# Altium footprint library WR-WTB_2.00mm.PcbLib: 70 footprints (part 2 of 5)
Each footprint in its own frame and in the unit in brackets; x right, y up, seen from the top. Pads: shape width x height; smd on the part's side, far side on the other; paste and mask are expansions set on the pad; w line width, h text height; cw(c..) or ccw(c..) is an arc to the next point about the centre after c.
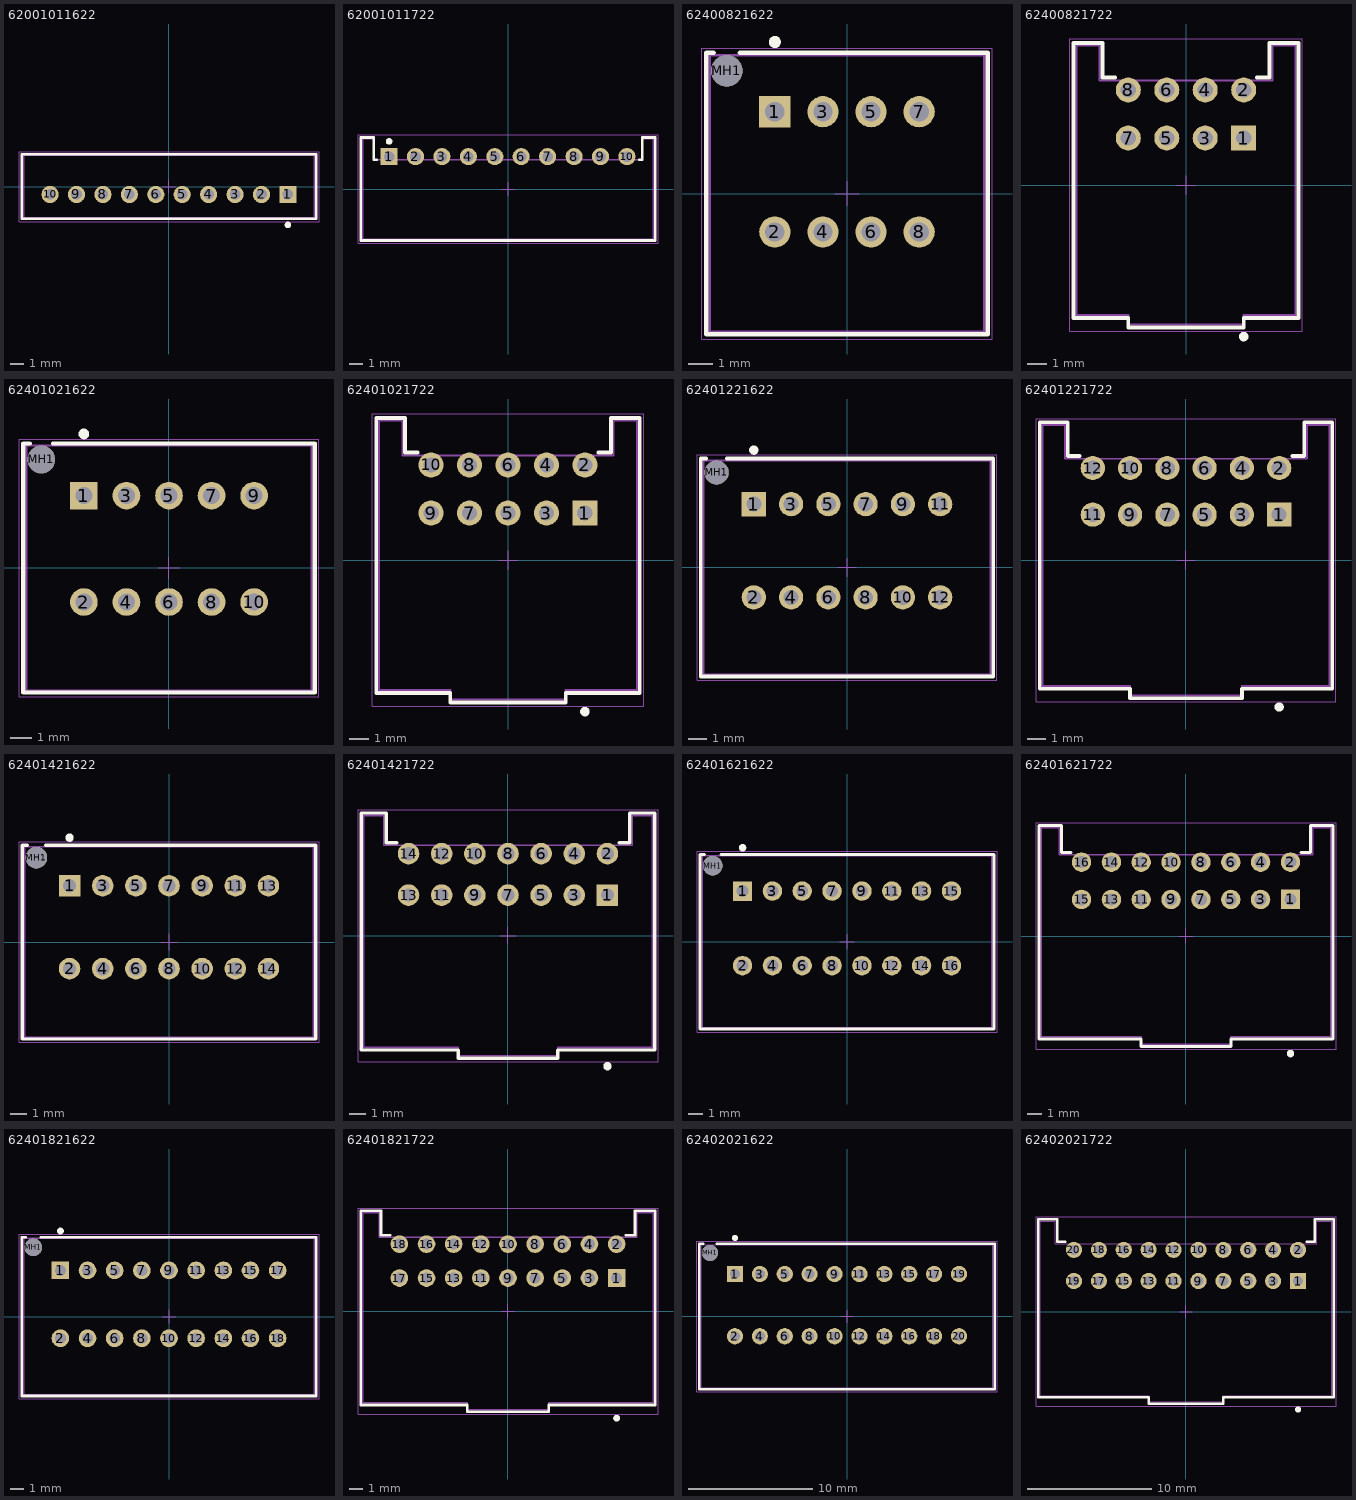
[diagram p1: the footprints below, top view; thin cyan lines are the x and y axes]

## 62001011622 [mm] "2.00mm Male Vertical Shrouded Header, 10p"
height 6.1
pads (10):
  rect 1.3x1.3 hole 0.8: 1(9,-0.6)
  round 1.3 hole 0.8: 2(7,-0.6) 3(5,-0.6) 4(3,-0.6) 5(1,-0.6) 6(-1,-0.6) 7(-3,-0.6) 8(-5,-0.6) 9(-7,-0.6) 10(-9,-0.6)
Top Overlay:
  circle w0.25: c9,-2.9 r0.125
  lines w0.2: -11.15,-2.45 11.15,-2.45 11.15,2.45 -11.15,2.45 -11.15,-2.45
Mechanical 13:
  lines w0.1: -11,-2.35 -11,2.35 11,2.35 11,-2.35 -11,-2.35
Mechanical 15:
  lines w0.05: -0.5,0 0.5,0 ; 0,-0.5 0,0.5 ; -11.35,-2.65 11.35,-2.65 11.35,2.65 -11.35,2.65 -11.35,-2.65
3D body "62001011622.stp": height 6.13, standoff -3.37, extent -11,-2.35 11,2.35

## 62001011722 [mm] "2.00mm Male Horizontal Shrouded Header, 10p"
height 4.5
pads (10):
  rect 1.3x1.3 hole 0.8: 1(-9,2.45)
  round 1.3 hole 0.8: 2(-7,2.45) 3(-5,2.45) 4(-3,2.45) 5(-1,2.45) 6(1,2.45) 7(3,2.45) 8(5,2.45) 9(7,2.45) 10(9,2.45)
Top Overlay:
  circle w0.25: c-9,3.6 r0.125
  lines w0.2: -9.95,2.2 -10.15,2.2 -10.15,3.9 -11.15,3.9 -11.15,-3.9 11.15,-3.9 11.15,3.9 10.15,3.9 10.15,2.2 9.95,2.2
Mechanical 13:
  lines w0.1: -11,-3.8 11,-3.8 11,3.8 10.15,3.8 10.15,2.2 -10.15,2.2 -10.15,3.8 -11,3.8 -11,-3.8
Mechanical 15:
  lines w0.05: -0.5,0 0.5,0 ; 0,-0.5 0,0.5 ; -11.35,-4.1 -11.35,4.1 11.35,4.1 11.35,-4.1 -11.35,-4.1
3D body "62001011722.stp": height 4.83, standoff -3.27, extent -11,-3.8 11,3.8

## 62400821622 [mm] "2.00mm Male Dual Row Vertical Shrouded Header with positive locking, 8p"
height 11.6
pads (9):
  rect 1.3x1.3 hole 0.8: 1(-3,3.4)
  round 1.3 hole 0.8: 2(-3,-1.6) 3(-1,3.4) 4(-1,-1.6) 5(1,3.4) 6(1,-1.6) 7(3,3.4) 8(3,-1.6)
  round 1.3 hole 1.3 unplated: MH1(-5,5.1)
Top Overlay:
  circle w0.25: c-3,6.3 r0.125
  lines w0.2: -5.55,5.85 -5.85,5.85 -5.85,-5.85 5.85,-5.85 5.85,5.85 -4.45,5.85
Mechanical 13:
  lines w0.1: -5.7,-5.75 -5.7,5.75 ; -5.7,-5.75 5.7,-5.75 5.7,5.75 -5.7,5.75 ; -5.7,-5.75 -5.7,5.75
Mechanical 15:
  lines w0.05: -0.5,0 0.5,0 ; 0,-0.5 0,0.5 ; -6.05,-6.05 6.05,-6.05 6.05,6.05 -6.05,6.05 -6.05,-6.05
3D body "62400821622.stp": height 9.78, standoff -3.17, extent -5.7,-5.75 5.7,5.75

## 62400821722 [mm] "2.00mm Male Dual Row Horizontal Shrouded Header with positive locking, 8p"
height 11.7
pads (8):
  rect 1.3x1.3 hole 0.8: 1(3,2.45)
  round 1.3 hole 0.8: 2(3,4.95) 3(1,2.45) 4(1,4.95) 5(-1,2.45) 6(-1,4.95) 7(-3,2.45) 8(-3,4.95)
Top Overlay:
  circle w0.25: c3,-7.875 r0.125
  lines w0.2: -3.7,5.6 -4.35,5.6 -4.35,7.4 -5.85,7.4 -5.85,-6.9 -3,-6.9 -3,-7.4 3,-7.4 3,-6.9 5.85,-6.9 5.85,7.4 4.35,7.4 4.35,5.6 3.7,5.6
Mechanical 13:
  lines w0.1: -5.7,-6.75 -3,-6.75 -3,-7.25 3,-7.25 3,-6.75 5.7,-6.75 5.7,7.25 4.5,7.25 4.5,5.45 -4.5,5.45 -4.5,7.25 -5.7,7.25 -5.7,-6.75
Mechanical 15:
  lines w0.05: -0.5,0 0.5,0 ; 0,-0.5 0,0.5 ; -6.05,-7.6 6.05,-7.6 6.05,7.6 -6.05,7.6 -6.05,-7.6
3D body "62400821722.stp": height 11.73, standoff -3.17, extent -5.7,-7.25 5.7,7.25

## 62401021622 [mm] "2.00mm Male Dual Row Vertical Shrouded Header with positive locking, 10p"
height 11.6
pads (11):
  rect 1.3x1.3 hole 0.8: 1(-4,3.4)
  round 1.3 hole 0.8: 2(-4,-1.6) 3(-2,3.4) 4(-2,-1.6) 5(0,3.4) 6(0,-1.6) 7(2,3.4) 8(2,-1.6) 9(4,3.4) 10(4,-1.6)
  round 1.3 hole 1.3 unplated: MH1(-6,5.1)
Top Overlay:
  circle w0.25: c-4,6.3 r0.125
  lines w0.2: -6.55,5.85 -6.85,5.85 -6.85,-5.85 6.85,-5.85 6.85,5.85 -5.45,5.85
Mechanical 13:
  lines w0.1: -6.7,-5.75 -6.7,5.75 ; -6.7,-5.75 6.7,-5.75 6.7,5.75 -6.7,5.75 ; -6.7,-5.75 -6.7,5.75
Mechanical 15:
  lines w0.05: -0.5,0 0.5,0 ; 0,-0.5 0,0.5 ; -7.05,-6.05 7.05,-6.05 7.05,6.05 -7.05,6.05 -7.05,-6.05
3D body "62401021622.stp": height 9.78, standoff -3.17, extent -6.7,-5.75 6.7,5.75

## 62401021722 [mm] "2.00mm Male Dual Row Horizontal Shrouded Header with positive locking, 10p"
height 11.7
pads (10):
  rect 1.3x1.3 hole 0.8: 1(4,2.45)
  round 1.3 hole 0.8: 2(4,4.95) 3(2,2.45) 4(2,4.95) 5(0,2.45) 6(0,4.95) 7(-2,2.45) 8(-2,4.95) 9(-4,2.45) 10(-4,4.95)
Top Overlay:
  circle w0.25: c4,-7.875 r0.125
  lines w0.2: -4.7,5.6 -5.35,5.6 -5.35,7.4 -6.85,7.4 -6.85,-6.9 -3,-6.9 -3,-7.4 3,-7.4 3,-6.9 6.85,-6.9 6.85,7.4 5.35,7.4 5.35,5.6 4.7,5.6
Mechanical 13:
  lines w0.1: -6.7,-6.75 -3,-6.75 -3,-7.25 3,-7.25 3,-6.75 6.7,-6.75 6.7,7.25 5.5,7.25 5.5,5.45 -5.5,5.45 -5.5,7.25 -6.7,7.25 -6.7,-6.75
Mechanical 15:
  lines w0.05: -0.5,0 0.5,0 ; 0,-0.5 0,0.5 ; -7.05,-7.6 7.05,-7.6 7.05,7.6 -7.05,7.6 -7.05,-7.6
3D body "62401021722.stp": height 11.73, standoff -3.17, extent -6.7,-7.25 6.7,7.25

## 62401221622 [mm] "2.00mm Male Dual Row Vertical Shrouded Header with positive locking, 12p"
height 11.6
pads (13):
  rect 1.3x1.3 hole 0.8: 1(-5,3.4)
  round 1.3 hole 0.8: 2(-5,-1.6) 3(-3,3.4) 4(-3,-1.6) 5(-1,3.4) 6(-1,-1.6) 7(1,3.4) 8(1,-1.6) 9(3,3.4) 10(3,-1.6) 11(5,3.4) 12(5,-1.6)
  round 1.3 hole 1.3 unplated: MH1(-7,5.1)
Top Overlay:
  circle w0.25: c-5,6.3 r0.125
  lines w0.2: -7.55,5.85 -7.85,5.85 -7.85,-5.85 7.85,-5.85 7.85,5.85 -6.45,5.85
Mechanical 13:
  lines w0.1: -7.7,-5.75 -7.7,5.75 ; -7.7,-5.75 7.7,-5.75 7.7,5.75 -7.7,5.75 ; -7.7,-5.75 -7.7,5.75
Mechanical 15:
  lines w0.05: -0.5,0 0.5,0 ; 0,-0.5 0,0.5 ; -8.05,-6.05 -8.05,6.05 8.05,6.05 8.05,-6.05 -8.05,-6.05
3D body "62401221622.stp": height 9.78, standoff -3.17, extent -7.7,-5.75 7.7,5.75

## 62401221722 [mm] "2.00mm Male Dual Row Horizontal Shrouded Header with positive locking, 12p"
height 11.7
pads (12):
  rect 1.3x1.3 hole 0.8: 1(5,2.45)
  round 1.3 hole 0.8: 2(5,4.95) 3(3,2.45) 4(3,4.95) 5(1,2.45) 6(1,4.95) 7(-1,2.45) 8(-1,4.95) 9(-3,2.45) 10(-3,4.95) 11(-5,2.45) 12(-5,4.95)
Top Overlay:
  circle w0.25: c5,-7.875 r0.125
  lines w0.2: -5.7,5.6 -6.35,5.6 -6.35,7.4 -7.85,7.4 -7.85,-6.9 -3,-6.9 -3,-7.4 3,-7.4 3,-6.9 7.85,-6.9 7.85,7.4 6.35,7.4 6.35,5.6 5.7,5.6
Mechanical 13:
  lines w0.1: -7.7,-6.75 -3,-6.75 -3,-7.25 3,-7.25 3,-6.75 7.7,-6.75 7.7,7.25 6.5,7.25 6.5,5.45 -6.5,5.45 -6.5,7.25 -7.7,7.25 -7.7,-6.75
Mechanical 15:
  lines w0.05: -0.5,0 0.5,0 ; 0,-0.5 0,0.5 ; -8.05,-7.6 8.05,-7.6 8.05,7.6 -8.05,7.6 -8.05,-7.6
3D body "62401221722.stp": height 11.73, standoff -3.17, extent -7.7,-7.25 7.7,7.25

## 62401421622 [mm] "2.00mm Male Dual Row Vertical Shrouded Header with positive locking, 14p"
height 11.6
pads (15):
  rect 1.3x1.3 hole 0.8: 1(-6,3.4)
  round 1.3 hole 0.8: 2(-6,-1.6) 3(-4,3.4) 4(-4,-1.6) 5(-2,3.4) 6(-2,-1.6) 7(0,3.4) 8(0,-1.6) 9(2,3.4) 10(2,-1.6) 11(4,3.4) 12(4,-1.6) 13(6,3.4) 14(6,-1.6)
  round 1.3 hole 1.3 unplated: MH1(-8,5.1)
Top Overlay:
  circle w0.25: c-6,6.3 r0.125
  lines w0.2: -8.55,5.85 -8.85,5.85 -8.85,-5.85 8.85,-5.85 8.85,5.85 -7.45,5.85
Mechanical 13:
  lines w0.1: -8.7,-5.75 -8.7,5.75 ; -8.7,-5.75 8.7,-5.75 8.7,5.75 -8.7,5.75 ; -8.7,-5.75 -8.7,5.75
Mechanical 15:
  lines w0.05: -0.5,0 0.5,0 ; 0,-0.5 0,0.5 ; -9.05,-6.05 9.05,-6.05 9.05,6.05 -9.05,6.05 -9.05,-6.05
3D body "62401421622.stp": height 9.78, standoff -3.17, extent -8.7,-5.75 8.7,5.75

## 62401421722 [mm] "2.00mm Male Dual Row Horizontal Shrouded Header with positive locking, 14p"
height 11.7
pads (14):
  rect 1.3x1.3 hole 0.8: 1(6,2.45)
  round 1.3 hole 0.8: 2(6,4.95) 3(4,2.45) 4(4,4.95) 5(2,2.45) 6(2,4.95) 7(0,2.45) 8(0,4.95) 9(-2,2.45) 10(-2,4.95) 11(-4,2.45) 12(-4,4.95) 13(-6,2.45) 14(-6,4.95)
Top Overlay:
  circle w0.25: c6,-7.875 r0.125
  lines w0.2: -6.7,5.6 -7.35,5.6 -7.35,7.4 -8.85,7.4 -8.85,-6.9 -3,-6.9 -3,-7.4 3,-7.4 3,-6.9 8.85,-6.9 8.85,7.4 7.35,7.4 7.35,5.6 6.7,5.6
Mechanical 13:
  lines w0.1: -8.7,-6.75 -8.7,7.25 -7.5,7.25 -7.5,5.45 7.5,5.45 7.5,7.25 8.7,7.25 8.7,-6.75 3,-6.75 3,-7.25 -3,-7.25 -3,-6.75 -8.7,-6.75
Mechanical 15:
  lines w0.05: -0.5,0 0.5,0 ; 0,-0.5 0,0.5 ; -9.05,-7.6 -9.05,7.6 9.05,7.6 9.05,-7.6 -9.05,-7.6
3D body "62401421722.stp": height 11.73, standoff -3.17, extent -8.7,-7.25 8.7,7.25

## 62401621622 [mm] "2.00mm Male Dual Row Vertical Shrouded Header with positive locking, 16p"
height 11.6
pads (17):
  rect 1.3x1.3 hole 0.8: 1(-7,3.4)
  round 1.3 hole 0.8: 2(-7,-1.6) 3(-5,3.4) 4(-5,-1.6) 5(-3,3.4) 6(-3,-1.6) 7(-1,3.4) 8(-1,-1.6) 9(1,3.4) 10(1,-1.6) 11(3,3.4) 12(3,-1.6) 13(5,3.4) 14(5,-1.6) 15(7,3.4) 16(7,-1.6)
  round 1.3 hole 1.3 unplated: MH1(-9,5.1)
Top Overlay:
  circle w0.25: c-7,6.3 r0.125
  lines w0.2: -9.55,5.85 -9.85,5.85 -9.85,-5.85 9.85,-5.85 9.85,5.85 -8.45,5.85
Mechanical 13:
  lines w0.1: -9.7,-5.75 -9.7,5.75 ; -9.7,-5.75 9.7,-5.75 9.7,5.75 -9.7,5.75 ; -9.7,-5.75 -9.7,5.75
Mechanical 15:
  lines w0.05: -0.5,0 0.5,0 ; 0,-0.5 0,0.5 ; -10.05,-6.05 10.05,-6.05 10.05,6.05 -10.05,6.05 -10.05,-6.05
3D body "62401621622.stp": height 9.78, standoff -3.17, extent -9.7,-5.75 9.7,5.75

## 62401621722 [mm] "2.00mm Male Dual Row Horizontal Shrouded Header with positive locking, 16p"
height 11.7
pads (16):
  rect 1.3x1.3 hole 0.8: 1(7,2.45)
  round 1.3 hole 0.8: 2(7,4.95) 3(5,2.45) 4(5,4.95) 5(3,2.45) 6(3,4.95) 7(1,2.45) 8(1,4.95) 9(-1,2.45) 10(-1,4.95) 11(-3,2.45) 12(-3,4.95) 13(-5,2.45) 14(-5,4.95) 15(-7,2.45) 16(-7,4.95)
Top Overlay:
  circle w0.25: c7,-7.875 r0.125
  lines w0.2: -7.7,5.6 -8.35,5.6 -8.35,7.4 -9.85,7.4 -9.85,-6.9 -3,-6.9 -3,-7.4 3,-7.4 3,-6.9 9.85,-6.9 9.85,7.4 8.35,7.4 8.35,5.6 7.7,5.6
Mechanical 13:
  lines w0.1: -9.7,-6.75 -9.7,7.25 -8.5,7.25 -8.5,5.45 8.5,5.45 8.5,7.25 9.7,7.25 9.7,-6.75 3,-6.75 3,-7.25 -3,-7.25 -3,-6.75 -9.7,-6.75
Mechanical 15:
  lines w0.05: -0.5,0 0.5,0 ; 0,-0.5 0,0.5 ; -10.05,-7.6 -10.05,7.6 10.05,7.6 10.05,-7.6 -10.05,-7.6
3D body "62401621722.stp": height 11.73, standoff -3.17, extent -9.7,-7.25 9.7,7.25

## 62401821622 [mm] "2.00mm Male Dual Row Vertical Shrouded Header with positive locking, 18p"
height 11.6
pads (19):
  rect 1.3x1.3 hole 0.8: 1(-8,3.4)
  round 1.3 hole 0.8: 2(-8,-1.6) 3(-6,3.4) 4(-6,-1.6) 5(-4,3.4) 6(-4,-1.6) 7(-2,3.4) 8(-2,-1.6) 9(0,3.4) 10(0,-1.6) 11(2,3.4) 12(2,-1.6) 13(4,3.4) 14(4,-1.6) 15(6,3.4) 16(6,-1.6) 17(8,3.4) 18(8,-1.6)
  round 1.3 hole 1.3 unplated: MH1(-10,5.1)
Top Overlay:
  circle w0.25: c-8,6.3 r0.125
  lines w0.2: -10.55,5.85 -10.85,5.85 -10.85,-5.85 10.85,-5.85 10.85,5.85 -9.45,5.85
Mechanical 13:
  lines w0.1: -10.7,-5.75 -10.7,5.75 ; -10.7,-5.75 10.7,-5.75 10.7,5.75 -10.7,5.75 ; -10.7,-5.75 -10.7,5.75
Mechanical 15:
  lines w0.05: -0.5,0 0.5,0 ; 0,-0.5 0,0.5 ; -11.05,-6.05 -11.05,6.05 11.05,6.05 11.05,-6.05 -11.05,-6.05
3D body "62401821622.stp": height 9.78, standoff -3.17, extent -10.7,-5.75 10.7,5.75

## 62401821722 [mm] "2.00mm Male Dual Row Horizontal Shrouded Header with positive locking, 18p"
height 11.7
pads (18):
  rect 1.3x1.3 hole 0.8: 1(8,2.45)
  round 1.3 hole 0.8: 2(8,4.95) 3(6,2.45) 4(6,4.95) 5(4,2.45) 6(4,4.95) 7(2,2.45) 8(2,4.95) 9(0,2.45) 10(0,4.95) 11(-2,2.45) 12(-2,4.95) 13(-4,2.45) 14(-4,4.95) 15(-6,2.45) 16(-6,4.95) 17(-8,2.45) 18(-8,4.95)
Top Overlay:
  circle w0.25: c8,-7.875 r0.125
  lines w0.2: -8.7,5.6 -9.35,5.6 -9.35,7.4 -10.85,7.4 -10.85,-6.9 -3,-6.9 -3,-7.4 3,-7.4 3,-6.9 10.85,-6.9 10.85,7.4 9.35,7.4 9.35,5.6 8.7,5.6
Mechanical 13:
  lines w0.1: -10.7,-6.75 -3,-6.75 -3,-7.25 3,-7.25 3,-6.75 10.7,-6.75 10.7,7.25 9.5,7.25 9.5,5.45 -9.5,5.45 -9.5,7.25 -10.7,7.25 -10.7,-6.75
Mechanical 15:
  lines w0.05: -0.5,0 0.5,0 ; 0,-0.5 0,0.5 ; -11.05,-7.6 11.05,-7.6 11.05,7.6 -11.05,7.6 -11.05,-7.6
3D body "62401821722.stp": height 11.73, standoff -3.17, extent -10.7,-7.25 10.7,7.25

## 62402021622 [mm] "2.00mm Male Dual Row Vertical Shrouded Header with positive locking, 20p"
height 11.6
pads (21):
  rect 1.3x1.3 hole 0.8: 1(-9,3.4)
  round 1.3 hole 0.8: 2(-9,-1.6) 3(-7,3.4) 4(-7,-1.6) 5(-5,3.4) 6(-5,-1.6) 7(-3,3.4) 8(-3,-1.6) 9(-1,3.4) 10(-1,-1.6) 11(1,3.4) 12(1,-1.6) 13(3,3.4) 14(3,-1.6) 15(5,3.4) 16(5,-1.6) 17(7,3.4) 18(7,-1.6) 19(9,3.4) 20(9,-1.6)
  round 1.3 hole 1.3 unplated: MH1(-11,5.1)
Top Overlay:
  circle w0.25: c-9,6.3 r0.125
  lines w0.2: -11.55,5.85 -11.85,5.85 -11.85,-5.85 11.85,-5.85 11.85,5.85 -10.45,5.85
Mechanical 13:
  lines w0.1: -11.7,-5.75 -11.7,5.75 ; -11.7,-5.75 11.7,-5.75 11.7,5.75 -11.7,5.75 ; -11.7,-5.75 -11.7,5.75
Mechanical 15:
  lines w0.05: -0.5,0 0.5,0 ; 0,-0.5 0,0.5 ; -12.05,-6.05 -12.05,6.05 12.05,6.05 12.05,-6.05 -12.05,-6.05
3D body "62402021622.stp": height 9.78, standoff -3.17, extent -11.7,-5.75 11.7,5.75

## 62402021722 [mm] "2.00mm Male Dual Row Horizontal Shrouded Header with positive locking, 20p"
height 11.7
pads (20):
  rect 1.3x1.3 hole 0.8: 1(9,2.45)
  round 1.3 hole 0.8: 2(9,4.95) 3(7,2.45) 4(7,4.95) 5(5,2.45) 6(5,4.95) 7(3,2.45) 8(3,4.95) 9(1,2.45) 10(1,4.95) 11(-1,2.45) 12(-1,4.95) 13(-3,2.45) 14(-3,4.95) 15(-5,2.45) 16(-5,4.95) 17(-7,2.45) 18(-7,4.95) 19(-9,2.45) 20(-9,4.95)
Top Overlay:
  circle w0.25: c9,-7.875 r0.125
  lines w0.2: -9.7,5.6 -10.35,5.6 -10.35,7.4 -11.85,7.4 -11.85,-6.9 -3,-6.9 -3,-7.4 3,-7.4 3,-6.9 11.85,-6.9 11.85,7.4 10.35,7.4 10.35,5.6 9.7,5.6
Mechanical 13:
  lines w0.1: -11.7,-6.75 -3,-6.75 -3,-7.25 3,-7.25 3,-6.75 11.7,-6.75 11.7,7.25 10.5,7.25 10.5,5.45 -10.5,5.45 -10.5,7.25 -11.7,7.25 -11.7,-6.75
Mechanical 15:
  lines w0.05: -0.5,0 0.5,0 ; 0,-0.5 0,0.5 ; -12.05,-7.6 12.05,-7.6 12.05,7.6 -12.05,7.6 -12.05,-7.6
3D body "62402021722.stp": height 11.73, standoff -3.17, extent -11.7,-7.25 11.7,7.25